# Altium footprint library Connector_SMD.PcbLib: 116 footprints (part 2 of 8)
Each footprint in its own frame and in the unit in brackets; x right, y up, seen from the top. Pads: shape width x height; smd on the part's side, far side on the other; paste and mask are expansions set on the pad; w line width, h text height; cw(c..) or ccw(c..) is an arc to the next point about the centre after c.
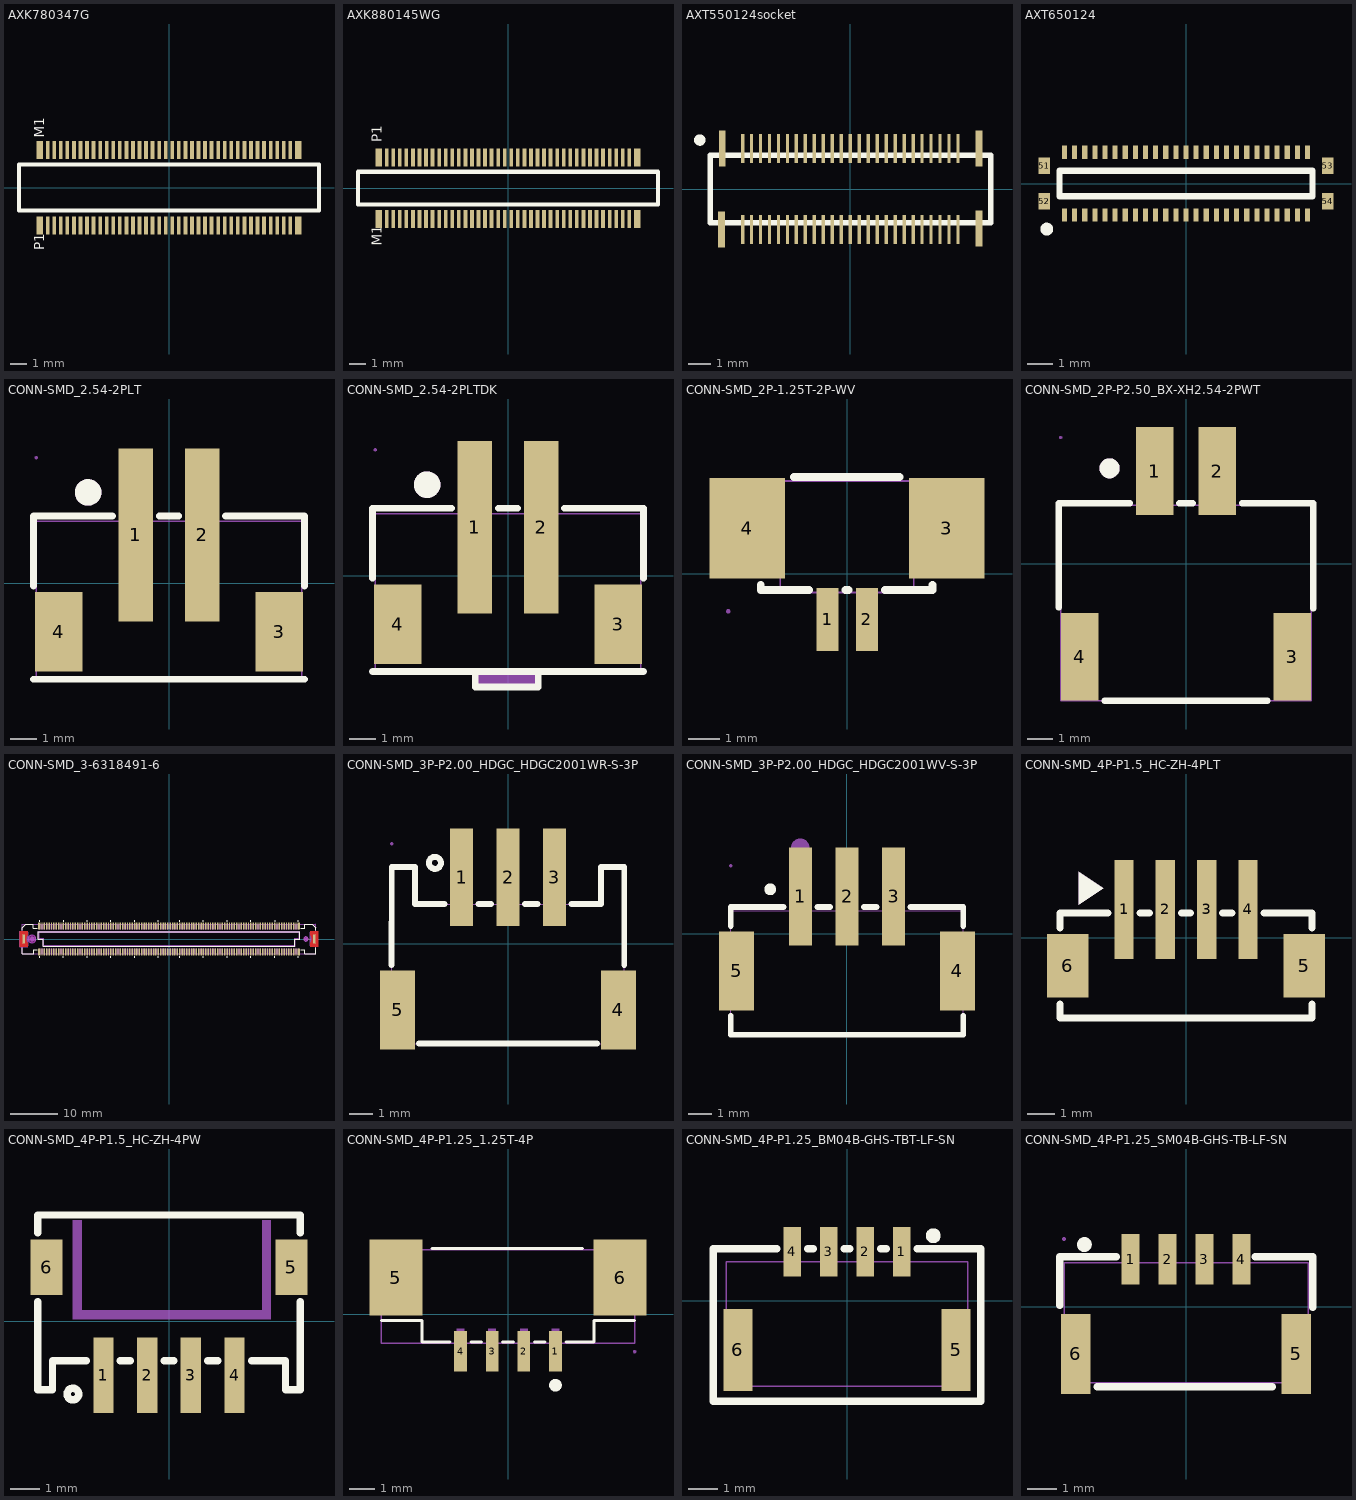
[diagram p1: the footprints below, top view; thin cyan lines are the x and y axes]

## AXK780347G [mm]
height 2
pads (80):
  rect 0.4x1.1 smd: M1(-7.885,2.3) M40(7.885,2.3) P1(-7.885,-2.3) P40(7.885,-2.3)
  rect 0.23x1.1 smd: M2(-7.4,2.3) M3(-7,2.3) M4(-6.6,2.3) M5(-6.2,2.3) M6(-5.8,2.3) M7(-5.4,2.3) M8(-5,2.3) M9(-4.6,2.3) M10(-4.2,2.3) M11(-3.8,2.3) M12(-3.4,2.3) M13(-3,2.3) M14(-2.6,2.3) M15(-2.2,2.3) M16(-1.8,2.3) M17(-1.4,2.3) M18(-1,2.3) M19(-0.6,2.3) M20(-0.2,2.3) M21(0.2,2.3) M22(0.6,2.3) M23(1,2.3) M24(1.4,2.3) M25(1.8,2.3) M26(2.2,2.3) M27(2.6,2.3) M28(3,2.3) M29(3.4,2.3) M30(3.8,2.3) M31(4.2,2.3) M32(4.6,2.3) M33(5,2.3) M34(5.4,2.3) M35(5.8,2.3) M36(6.2,2.3) M37(6.6,2.3) M38(7,2.3) M39(7.4,2.3) P2(-7.4,-2.3) P3(-7,-2.3) P4(-6.6,-2.3) P5(-6.2,-2.3) P6(-5.8,-2.3) P7(-5.4,-2.3) P8(-5,-2.3) P9(-4.6,-2.3) P10(-4.2,-2.3) P11(-3.8,-2.3) P12(-3.4,-2.3) P13(-3,-2.3) P14(-2.6,-2.3) P15(-2.2,-2.3) P16(-1.8,-2.3) P17(-1.4,-2.3) P18(-1,-2.3) P19(-0.6,-2.3) P20(-0.2,-2.3) P21(0.2,-2.3) P22(0.6,-2.3) P23(1,-2.3) P24(1.4,-2.3) P25(1.8,-2.3) P26(2.2,-2.3) P27(2.6,-2.3) P28(3,-2.3) P29(3.4,-2.3) P30(3.8,-2.3) P31(4.2,-2.3) P32(4.6,-2.3) P33(5,-2.3) P34(5.4,-2.3) P35(5.8,-2.3) P36(6.2,-2.3) P37(6.6,-2.3) P38(7,-2.3) P39(7.4,-2.3)
Top Overlay:
  lines w0.254: -9.15,-1.4 -9.15,1.4 9.15,1.4 9.15,-1.4 -9.15,-1.4
  text "P1" at -7.6,-3.825 h0.6
  text "M1" at -7.6,3.05 h0.6

## AXK880145WG [mm]
pads (80):
  rect 0.4x1.1 smd: M1(-7.885,-1.88) M40(7.885,-1.88) P1(-7.885,1.88) P40(7.885,1.88)
  rect 0.23x1.1 smd: M2(-7.4,-1.88) M3(-7,-1.88) M4(-6.6,-1.88) M5(-6.2,-1.88) M6(-5.8,-1.88) M7(-5.4,-1.88) M8(-5,-1.88) M9(-4.6,-1.88) M10(-4.2,-1.88) M11(-3.8,-1.88) M12(-3.4,-1.88) M13(-3,-1.88) M14(-2.6,-1.88) M15(-2.2,-1.88) M16(-1.8,-1.88) M17(-1.4,-1.88) M18(-1,-1.88) M19(-0.6,-1.88) M20(-0.2,-1.88) M21(0.2,-1.88) M22(0.6,-1.88) M23(1,-1.88) M24(1.4,-1.88) M25(1.8,-1.88) M26(2.2,-1.88) M27(2.6,-1.88) M28(3,-1.88) M29(3.4,-1.88) M30(3.8,-1.88) M31(4.2,-1.88) M32(4.6,-1.88) M33(5,-1.88) M34(5.4,-1.88) M35(5.8,-1.88) M36(6.2,-1.88) M37(6.6,-1.88) M38(7,-1.88) M39(7.4,-1.88) P2(-7.4,1.88) P3(-7,1.88) P4(-6.6,1.88) P5(-6.2,1.88) P6(-5.8,1.88) P7(-5.4,1.88) P8(-5,1.88) P9(-4.6,1.88) P10(-4.2,1.88) P11(-3.8,1.88) P12(-3.4,1.88) P13(-3,1.88) P14(-2.6,1.88) P15(-2.2,1.88) P16(-1.8,1.88) P17(-1.4,1.88) P18(-1,1.88) P19(-0.6,1.88) P20(-0.2,1.88) P21(0.2,1.88) P22(0.6,1.88) P23(1,1.88) P24(1.4,1.88) P25(1.8,1.88) P26(2.2,1.88) P27(2.6,1.88) P28(3,1.88) P29(3.4,1.88) P30(3.8,1.88) P31(4.2,1.88) P32(4.6,1.88) P33(5,1.88) P34(5.4,1.88) P35(5.8,1.88) P36(6.2,1.88) P37(6.6,1.88) P38(7,1.88) P39(7.4,1.88)
Top Overlay:
  lines w0.254: -9.15,-1 -9.15,1 9.15,1 9.15,-1 -9.15,-1
  text "P1" at -7.7,2.8 h0.6
  text "M1" at -7.7,-3.5 h0.6

## AXT550124socket [mm]
pads (54):
  rect 0.15x1.3 smd mask+0.102: 1(-4.802,1.8) 2(-4.802,-1.8) 3(-4.402,1.8) 4(-4.402,-1.8) 5(-4.002,1.8) 6(-4.002,-1.8) 7(-3.602,1.8) 8(-3.602,-1.8) 9(-3.202,1.8) 10(-3.202,-1.8) 11(-2.802,1.8) 12(-2.802,-1.8) 13(-2.402,1.8) 14(-2.402,-1.8) 15(-2.002,1.8) 16(-2.002,-1.8) 17(-1.602,1.8) 18(-1.602,-1.8) 19(-1.202,1.8) 20(-1.202,-1.8) 21(-0.802,1.8) 22(-0.802,-1.8) 23(-0.402,1.8) 24(-0.402,-1.8) 25(-0.002,1.8) 26(-0.002,-1.8) 27(0.398,1.8) 28(0.398,-1.8) 29(0.798,1.8) 30(0.798,-1.8) 31(1.198,1.8) 32(1.198,-1.8) 33(1.598,1.8) 34(1.598,-1.8) 35(1.998,1.8) 36(1.998,-1.8) 37(2.398,1.8) 38(2.398,-1.8) 39(2.798,1.8) 40(2.798,-1.8) 41(3.198,1.8) 42(3.198,-1.8) 43(3.598,1.8) 44(3.598,-1.8) 45(3.998,1.8) 46(3.998,-1.8) 47(4.398,1.8) 48(4.398,-1.8) 49(4.798,1.8) 50(4.798,-1.8)
  rect 0.3x1.6 smd mask+0.102: 51(-5.709,1.8) 52(-5.739,-1.8) 53(5.739,1.8) 54(5.739,-1.756)
Top Overlay:
  circle w0.254: c-6.707,2.181 r0.127
  lines w0.254: -6.242,-1.502 6.258,-1.502 6.258,1.498 -6.242,1.498 -6.242,-1.502
3D body "axt550124.stp": height 0.97, standoff 0, extent -6.25,-1.8 6.25,1.8

## AXT650124 [mm]
pads (54):
  rect 0.2x0.52 smd mask+0.102: 1(-4.8,-1.24) 2(-4.8,1.24) 3(-4.4,-1.24) 4(-4.4,1.24) 5(-4,-1.24) 6(-4,1.24) 7(-3.6,-1.24) 8(-3.6,1.24) 9(-3.2,-1.24) 10(-3.2,1.24) 11(-2.8,-1.24) 12(-2.8,1.24) 13(-2.4,-1.24) 14(-2.4,1.24) 15(-2,-1.24) 16(-2,1.24) 17(-1.6,-1.24) 18(-1.6,1.24) 19(-1.2,-1.24) 20(-1.2,1.24) 21(-0.8,-1.24) 22(-0.8,1.24) 23(-0.4,-1.24) 24(-0.4,1.24) 25(0,-1.24) 26(0,1.24) 27(0.4,-1.24) 28(0.4,1.24) 29(0.8,-1.24) 30(0.8,1.24) 31(1.2,-1.24) 32(1.2,1.24) 33(1.6,-1.24) 34(1.6,1.24) 35(2,-1.24) 36(2,1.24) 37(2.4,-1.24) 38(2.4,1.24) 39(2.8,-1.24) 40(2.8,1.24) 41(3.2,-1.24) 42(3.2,1.24) 43(3.6,-1.24) 44(3.6,1.24) 45(4,-1.24) 46(4,1.24) 47(4.4,-1.24) 48(4.4,1.24) 49(4.8,-1.24) 50(4.8,1.24)
  rect 0.45x0.655 smd mask+0.102: 51(-5.6,0.703) 52(-5.6,-0.703) 53(5.6,0.703) 54(5.6,-0.703)
Top Overlay:
  circle w0.254: c-5.5,-1.8 r0.127
  lines w0.254: -5,-0.5 5,-0.5 5,0.5 -5,0.5 -5,-0.5
3D body "axt650124.stp": height 0.83, standoff 0, extent -5.898,-1.3 5.902,1.3

## CONN-SMD_2.54-2PLT [mm]
pads (4):
  rect 1.3x6.5 smd paste+0 mask+0.05: 1(-1.25,1.825) 2(1.25,1.825)
  rect 1.8x3 smd paste+0 mask+0.05: 3(4.15,-1.825) 4(-4.15,-1.825)
Top Overlay:
  circle w0.5: c-3.048,3.429 r0.25
  lines w0.254: -5.1,-3.61 5.1,-3.61 ; -5.1,-0.099 -5.1,2.54 -3.83,2.54 -2.131,2.54 ; -0.369,2.54 0.369,2.54 ; 2.131,2.54 3.83,2.54 5.1,2.54 5.1,-0.099
Mechanical 6:
  circle w0.5: c-3.048,3.429 r0.25
Mechanical 15:
  region: -4.94,4.74 -4.94,4.765 -4.975,4.8 -5.025,4.8 -5.06,4.765 -5.06,4.74 -5.06,4.715 -5.025,4.68 -4.975,4.68 -4.94,4.715 -4.94,4.74
  region: -1.565,4.74 -0.935,4.74 -0.935,-0.26 -1.565,-0.26
  region: 0.935,4.74 1.565,4.74 1.565,-0.26 0.935,-0.26
  region: 3.75,-0.825 4.55,-0.825 4.55,-2.825 3.75,-2.825
  region: -4.55,-0.825 -3.75,-0.825 -3.75,-2.825 -4.55,-2.825
  lines w0.051: -5,-3.61 -5,2.34 5,2.34 5,-3.61 -5,-3.61
3D body "CN1.stp": height 8, standoff 0, extent -5.001,-3.774 5,5.226

## CONN-SMD_2.54-2PLTDK [mm]
pads (4):
  rect 1.3x6.5 smd paste+0 mask+0.05: 1(-1.25,1.825) 2(1.25,1.825)
  rect 1.8x3 smd paste+0 mask+0.05: 3(4.15,-1.825) 4(-4.15,-1.825)
Top Overlay:
  circle w0.5: c-3.048,3.429 r0.25
  lines w0.254: -5.1,-3.61 5.1,-3.61 ; -5.1,-0.099 -5.1,2.54 -3.83,2.54 -2.131,2.54 ; -1.236,-3.61 -1.236,-4.191 1.143,-4.191 1.143,-3.61 ; -0.369,2.54 0.369,2.54 ; 2.131,2.54 3.83,2.54 5.1,2.54 5.1,-0.099
Mechanical 6:
  circle w0.5: c-3.048,3.429 r0.25
  region: -1.27,-3.556 -1.27,-4.191 1.143,-4.191 1.143,-3.556
Mechanical 15:
  region: -4.94,4.74 -4.94,4.765 -4.975,4.8 -5.025,4.8 -5.06,4.765 -5.06,4.74 -5.06,4.715 -5.025,4.68 -4.975,4.68 -4.94,4.715 -4.94,4.74
  region: -1.565,4.74 -0.935,4.74 -0.935,-0.26 -1.565,-0.26
  region: 0.935,4.74 1.565,4.74 1.565,-0.26 0.935,-0.26
  region: 3.75,-0.825 4.55,-0.825 4.55,-2.825 3.75,-2.825
  region: -4.55,-0.825 -3.75,-0.825 -3.75,-2.825 -4.55,-2.825
  lines w0.051: -5,-3.61 -5,2.34 5,2.34 5,-3.61 -5,-3.61
3D body "U1.stp": height 7.92, standoff 0, extent -5,-4.593 5,4.307

## CONN-SMD_2P-1.25T-2P-WV [mil]
pads (4):
  rect 27.6x78.7 smd mask+2: 1(-24.4,-57.1) 2(24.8,-57.1)
  rect 94.5x126 smd mask+2: 3(125,57.1) 4(-125,57.1)
Top Overlay:
  lines w10: -108.1,-14.2 -108.1,-20.5 -83.5,-20.5 -47.5,-20.5 ; -66.3,121.2 65.9,121.2 ; -1.8,-20.5 1.7,-20.5 ; 47.5,-20.5 82.3,-20.5 107.3,-20.5 107.3,-14.2
Mechanical 15:
  region: -146.4,-47 -146.4,-46.01 -147.81,-44.6 -149.79,-44.6 -151.2,-46.01 -151.2,-47 -151.2,-47.99 -149.79,-49.4 -147.81,-49.4 -146.4,-47.99 -146.4,-47
  region: -30.3,-21.4 -18.5,-21.4 -18.5,-47 -30.3,-47
  region: 18.9,-21.4 30.7,-21.4 30.7,-47 18.9,-47
  region: 81.5,111.1 148.4,111.1 148.4,8.7 81.5,8.7
  region: -148.8,111 -81.9,111 -81.9,8.7 -148.8,8.7
  lines w2: -148.6,0 -83.7,0 -83.7,-23.4 83.7,-23.4 83.7,0 148.6,0 148.6,116.4 -148.6,116.4 -148.6,0
3D body "CN1.stp": height 185.02, standoff 0, extent -150.37,-42.5 150.77,118.94

## CONN-SMD_2P-P2.50_BX-XH2.54-2PWT [mm]
pads (4):
  rect 1.5x3.5 smd: 1(-1.25,3.7) 2(1.25,3.7) 3(4.23,-3.7) 4(-4.23,-3.7)
Top Overlay:
  circle w0.4: c-3.048,3.81 r0.2
  lines w0.254: -5.08,-1.742 -5.08,2.413 -2.231,2.413 ; -3.249,-5.461 3.249,-5.461 ; -0.269,2.413 0.269,2.413 ; 2.231,2.413 5.08,2.413 5.08,-1.778
Mechanical 6:
  circle w0.4: c-3.048,3.81 r0.2
Mechanical 15:
  region: -4.48,-2.2 -3.98,-2.2 -3.98,-5.2 -4.48,-5.2
  region: 3.98,-2.2 4.48,-2.2 4.48,-5.2 3.98,-5.2
  region: -1.57,5.039 -0.93,5.039 -0.93,2.039 -1.57,2.039
  region: 0.93,5.039 1.57,5.039 1.57,2.039 0.93,2.039
  region: -4.94,5.039 -4.941,5.063 -4.976,5.097 -5.024,5.097 -5.059,5.063 -5.06,5.039 -5.059,5.015 -5.024,4.981 -4.976,4.981 -4.941,5.015 -4.94,5.039
  lines w0.051: -5,-5.461 5,-5.461 5,2.339 -5,2.339 -5,-5.461
3D body "Gnj5-U1.stp": height 6.2, standoff 0, extent -5,-5.255 5,5.245

## CONN-SMD_3-6318491-6 [mm]
pads (222):
  rect 0.45x1.5 smd mask+0.051: 1(27.325,2.7) 2(27.325,-2.7) 219(-27.325,2.7) 220(-27.325,-2.7)
  rect 0.3x1.5 smd mask+0.051: 3(26.75,2.7) 4(26.75,-2.7) 5(26.25,2.7) 6(26.25,-2.7) 7(25.75,2.7) 8(25.75,-2.7) 9(25.25,2.7) 10(25.25,-2.7) 11(24.75,2.7) 12(24.75,-2.7) 13(24.25,2.7) 14(24.25,-2.7) 15(23.75,2.7) 16(23.75,-2.7) 17(23.25,2.7) 18(23.25,-2.7) 19(22.75,2.7) 20(22.75,-2.7) 21(22.25,2.7) 22(22.25,-2.7) 23(21.75,2.7) 24(21.75,-2.7) 25(21.25,2.7) 26(21.25,-2.7) 27(20.75,2.7) 28(20.75,-2.7) 29(20.25,2.7) 30(20.25,-2.7) 31(19.75,2.7) 32(19.75,-2.7) 33(19.25,2.7) 34(19.25,-2.7) 35(18.75,2.7) 36(18.75,-2.7) 37(18.25,2.7) 38(18.25,-2.7) 39(17.75,2.7) 40(17.75,-2.7) 41(17.25,2.7) 42(17.25,-2.7) 43(16.75,2.7) 44(16.75,-2.7) 45(16.25,2.7) 46(16.25,-2.7) 47(15.75,2.7) 48(15.75,-2.7) 49(15.25,2.7) 50(15.25,-2.7) 51(14.75,2.7) 52(14.75,-2.7) 53(14.25,2.7) 54(14.25,-2.7) 55(13.75,2.7) 56(13.75,-2.7) 57(13.25,2.7) 58(13.25,-2.7) 59(12.75,2.7) 60(12.75,-2.7) 61(12.25,2.7) 62(12.25,-2.7) 63(11.75,2.7) 64(11.75,-2.7) 65(11.25,2.7) 66(11.25,-2.7) 67(10.75,2.7) 68(10.75,-2.7) 69(10.25,2.7) 70(10.25,-2.7) 71(9.75,2.7) 72(9.75,-2.7) 73(9.25,2.7) 74(9.25,-2.7) 75(8.75,2.7) 76(8.75,-2.7) 77(8.25,2.7) 78(8.25,-2.7) 79(7.75,2.7) 80(7.75,-2.7) 81(7.25,2.7) 82(7.25,-2.7) 83(6.75,2.7) 84(6.75,-2.7) 85(6.25,2.7) 86(6.25,-2.7) 87(5.75,2.7) 88(5.75,-2.7) 89(5.25,2.7) 90(5.25,-2.7) 91(4.75,2.7) 92(4.75,-2.7) 93(4.25,2.7) 94(4.25,-2.7) 95(3.75,2.7) 96(3.75,-2.7) 97(3.25,2.7) 98(3.25,-2.7) 99(2.75,2.7) 100(2.75,-2.7) 101(2.25,2.7) 102(2.25,-2.7) 103(1.75,2.7) 104(1.75,-2.7) 105(1.25,2.7) 106(1.25,-2.7) 107(0.75,2.7) 108(0.75,-2.7) 109(0.25,2.7) 110(0.25,-2.7) 111(-0.25,2.7) 112(-0.25,-2.7) 113(-0.75,2.7) 114(-0.75,-2.7) 115(-1.25,2.7) 116(-1.25,-2.7) 117(-1.75,2.7) 118(-1.75,-2.7) 119(-2.25,2.7) 120(-2.25,-2.7) 121(-2.75,2.7) 122(-2.75,-2.7) 123(-3.25,2.7) 124(-3.25,-2.7) 125(-3.75,2.7) 126(-3.75,-2.7) 127(-4.25,2.7) 128(-4.25,-2.7) 129(-4.75,2.7) 130(-4.75,-2.7) 131(-5.25,2.7) 132(-5.25,-2.7) 133(-5.75,2.7) 134(-5.75,-2.7) 135(-6.25,2.7) 136(-6.25,-2.7) 137(-6.75,2.7) 138(-6.75,-2.7) 139(-7.25,2.7) 140(-7.25,-2.7) 141(-7.75,2.7) 142(-7.75,-2.7) 143(-8.25,2.7) 144(-8.25,-2.7) 145(-8.75,2.7) 146(-8.75,-2.7) 147(-9.25,2.7) 148(-9.25,-2.7) 149(-9.75,2.7) 150(-9.75,-2.7) 151(-10.25,2.7) 152(-10.25,-2.7) 153(-10.75,2.7) 154(-10.75,-2.7) 155(-11.25,2.7) 156(-11.25,-2.7) 157(-11.75,2.7) 158(-11.75,-2.7) 159(-12.25,2.7) 160(-12.25,-2.7) 161(-12.75,2.7) 162(-12.75,-2.7) 163(-13.25,2.7) 164(-13.25,-2.7) 165(-13.75,2.7) 166(-13.75,-2.7) 167(-14.25,2.7) 168(-14.25,-2.7) 169(-14.75,2.7) 170(-14.75,-2.7) 171(-15.25,2.7) 172(-15.25,-2.7) 173(-15.75,2.7) 174(-15.75,-2.7) 175(-16.25,2.7) 176(-16.25,-2.7) 177(-16.75,2.7) 178(-16.75,-2.7) 179(-17.25,2.7) 180(-17.25,-2.7) 181(-17.75,2.7) 182(-17.75,-2.7) 183(-18.25,2.7) 184(-18.25,-2.7) 185(-18.75,2.7) 186(-18.75,-2.7) 187(-19.25,2.7) 188(-19.25,-2.7) 189(-19.75,2.7) 190(-19.75,-2.7) 191(-20.25,2.7) 192(-20.25,-2.7) 193(-20.75,2.7) 194(-20.75,-2.7) 195(-21.25,2.7) 196(-21.25,-2.7) 197(-21.75,2.7) 198(-21.75,-2.7) 199(-22.25,2.7) 200(-22.25,-2.7) 201(-22.75,2.7) 202(-22.75,-2.7) 203(-23.25,2.7) 204(-23.25,-2.7) 205(-23.75,2.7) 206(-23.75,-2.7) 207(-24.25,2.7) 208(-24.25,-2.7) 209(-24.75,2.7) 210(-24.75,-2.7) 211(-25.25,2.7) 212(-25.25,-2.7) 213(-25.75,2.7) 214(-25.75,-2.7) 215(-26.25,2.7) 216(-26.25,-2.7) 217(-26.75,2.7) 218(-26.75,-2.7)
  rect 0.5x2 smd mask+0.051: 221(-30.6,0) 222(30.6,0)
Top Layer:
  region: -31.4,-1.65 -31.4,1.65 -29.75,1.65 -29.75,0.794 -29.818,0.709 -29.93,0.524 -30.006,0.321 -30.045,0.108 -30.045,-0.108 -30.006,-0.321 -29.93,-0.524 -29.818,-0.709 -29.75,-0.794 -29.75,-0.795 -29.75,-1.65
  region: 31.4,-1.65 31.4,1.65 29.75,1.65 29.75,0.794 29.818,0.709 29.93,0.524 30.006,0.321 30.045,0.108 30.045,-0.108 30.006,-0.321 29.93,-0.524 29.818,-0.709 29.75,-0.794 29.75,-0.795 29.75,-1.65
Top Overlay:
  lines w0.254: -30.9,-1.881 -30.9,-3.1 -28.5,-3.1 -28.5,-2.25 -27.781,-2.25 ; -30.899,1.88 -30.899,2.421 -30.221,3.099 -28.549,3.099 -28.549,2.251 -27.78,2.251 ; -27.5,1.5 -27.5,-0.01 -26.5,-0.01 -26.5,-1.5 26.5,-1.5 26.5,-0.01 27.5,-0.01 27.5,1.5 -27.49,1.5 ; -27.25,-4 -27.25,-3.625 ; -27.25,3.625 -27.25,4 ; -22.25,-4 -22.25,-3.625 ; -22.25,3.625 -22.25,4 ; -17.25,-4 -17.25,-3.625 ; -17.25,3.625 -17.25,4 ; -12.25,-4 -12.25,-3.625 ; -12.25,3.625 -12.25,4 ; -7.25,-4 -7.25,-3.625 ; -7.25,3.625 -7.25,4 ; -2.25,-4 -2.25,-3.625 ; -2.25,3.625 -2.25,4 ; 2.25,-4 2.25,-3.625 ; 2.25,3.625 2.25,4 ; 7.25,-4 7.25,-3.625 ; 7.25,3.625 7.25,4 ; 12.25,-4 12.25,-3.625 ; 12.25,3.625 12.25,4 ; 17.25,-4 17.25,-3.625 ; 17.25,3.625 17.25,4 ; 22.25,-4 22.25,-3.625 ; 22.25,3.625 22.25,4 ; 27.25,-4 27.25,-3.625 ; 27.25,3.625 27.25,4 ; 27.781,-2.25 28.55,-2.25 28.55,-3.1 28.762,-3.1 30.9,-3.1 30.9,-1.881 ; 27.781,2.25 28.55,2.25 28.55,3.1 30.22,3.1 30.9,2.42 30.9,1.881
Keep-Out Layer:
  board cut-out: 29.3,0 29.3,0.09 29.231,0.255 29.105,0.382 28.939,0.45 28.76,0.45 28.595,0.382 28.468,0.255 28.4,0.09 28.4,0 28.4,-0.09 28.468,-0.255 28.595,-0.382 28.76,-0.45 28.939,-0.45 29.105,-0.382 29.231,-0.255 29.3,-0.09 29.3,0
  board cut-out: -28.05,0 -28.05,0.105 -28.104,0.309 -28.21,0.491 -28.359,0.64 -28.541,0.745 -28.745,0.8 -28.955,0.8 -29.159,0.745 -29.341,0.64 -29.49,0.491 -29.595,0.309 -29.65,0.105 -29.65,0 -29.65,-0.105 -29.595,-0.309 -29.49,-0.491 -29.341,-0.64 -29.159,-0.745 -28.955,-0.8 -28.745,-0.8 -28.541,-0.745 -28.359,-0.64 -28.21,-0.491 -28.104,-0.309 -28.05,-0.105 -28.05,0
Mechanical 1:
  circle w0.005: c28.85,0 r0.45
  circle w0.005: c-28.85,0 r0.8
Mechanical 3:
  lines w0.025: -29.75,-0.794 cw(c-28.85,0) -29.75,0.794 -29.75,1.65 -31.4,1.65 -31.4,-1.65 -29.75,-1.65 ; -29.75,-1.65 -29.75,-0.795 ; -29.75,-1.65 -29.75,-1.65 ; -29.75,-0.795 -29.75,-0.795
Mechanical 6:
  circle w0.35: c28.85,0 r0.175
  circle w0.5: c-28.85,0 r0.25
  region: -27.35,1.35 27.3,1.35 27.3,0.15 26.35,0.15 26.35,-1.35 -26.35,-1.35 -26.35,-1.6 26.6,-1.6 26.6,-0.1 27.55,-0.1 27.55,1.6 -27.4,1.6 -27.4,1.35
  region: -26.35,-1.6 -26.6,-1.6 -26.6,-0.1 -27.65,-0.1 -27.65,1.6 -27.35,1.6 -27.35,0.2 -26.35,0.2
Mechanical 15:
  drawing of 227 lines, arcs and shapes, not listed
3D body "CN1.stp": height 7.45, standoff -0.6, extent -30.9,-3.1 30.9,3.1

## CONN-SMD_3P-P2.00_HDGC_HDGC2001WR-S-3P [mil]
pads (5):
  rect 39.4x165.4 smd mask+1.97: 1(-78.7,112.2) 2(0,112.2) 3(78.7,112.2)
  rect 59.1x133.9 smd mask+1.97: 4(187,-112.2) 5(-187,-112.2)
Top Overlay:
  circle w10: c-123.6,136.8 r10.2
  lines w10: -196.9,-36.2 -196.8,114.2 -196.8,129.9 -157.5,129.9 -157.5,66.9 -107.5,66.9 ; -150.6,-169.3 150.6,-169.3 ; -50,66.9 -28.8,66.9 ; 28.8,66.9 50,66.9 ; 107.5,66.9 157.5,66.9 157.5,129.9 196.8,129.9 196.8,114.2 196.8,-36.2
Mechanical 6:
  circle w15.7: c-80.7,177.2 r7.9
Mechanical 15:
  region: -194.5,169.3 -194.5,170.29 -195.91,171.7 -197.89,171.7 -199.3,170.29 -199.3,169.3 -199.3,168.31 -197.89,166.9 -195.91,166.9 -194.5,168.31 -194.5,169.3
  region: -88.6,169.3 -68.9,169.3 -68.9,51.2 -88.6,51.2
  region: -9.8,169.3 9.8,169.3 9.8,51.2 -9.8,51.2
  region: 68.9,169.3 88.6,169.3 88.6,51.2 68.9,51.2
  region: 163.4,-59.1 179.2,-59.1 179.2,-169.3 163.4,-169.3
  region: -179.2,-59.1 -163.4,-59.1 -163.4,-169.3 -179.2,-169.3
  lines w2: -196.9,129.9 -196.8,66.9 -196.8,-169.3 196.9,-169.3 196.9,66.9 196.8,129.9 157.5,129.9 157.5,66.9 -157.5,66.9 -157.5,129.9 -196.9,129.9
3D body "CN1.stp": height 221.26, standoff 0, extent -196.85,-169.29 196.89,169.29

## CONN-SMD_3P-P2.00_HDGC_HDGC2001WV-S-3P [mm]
pads (5):
  rect 1x4.2 smd mask+0.05: 1(-2,1.6) 2(0,1.6) 3(2,1.6)
  rect 1.5x3.4 smd mask+0.05: 4(4.75,-1.6) 5(-4.75,-1.6)
Top Overlay:
  circle w0.254: c-3.302,1.905 r0.127
  lines w0.254: -5,-3.531 -5,-4.35 5,-4.35 5,-3.531 ; -5,0.331 -5,1.15 -2.731,1.15 ; -1.269,1.15 -0.731,1.15 ; 0.731,1.15 1.269,1.15 ; 2.731,1.15 5,1.15 5,0.331
Mechanical 6:
  circle w0.4: c-2.013,3.688 r0.2
Mechanical 15:
  region: -4.94,2.924 -4.94,2.948 -4.975,2.984 -5.025,2.984 -5.06,2.948 -5.06,2.924 -5.06,2.899 -5.025,2.864 -4.975,2.864 -4.94,2.899 -4.94,2.924
  region: 1.75,2.924 2.25,2.924 2.25,-0.276 1.75,-0.276
  region: -0.25,2.924 0.25,2.924 0.25,-0.276 -0.25,-0.276
  region: -2.25,2.924 -1.75,2.924 -1.75,-0.276 -2.25,-0.276
  region: -5,-0.4 -4,-0.4 -4,-2.8 -5,-2.8
  region: 4,-0.4 5,-0.4 5,-2.8 4,-2.8
  lines w0.051: -5,-4.326 -5,0.974 5,0.974 5,-4.326 -5,-4.326
3D body "CN1.stp": height 6.67, standoff 0, extent -5,-4.3 5,3.151

## CONN-SMD_4P-P1.5_HC-ZH-4PLT [mm]
pads (6):
  rect 0.7x3.6 smd: 1(-2.25,1.025) 2(-0.75,1.025) 3(0.75,1.025) 4(2.25,1.025)
  rect 1.5x2.3 smd: 5(4.3,-1.025) 6(-4.3,-1.025)
Top Overlay:
  region: -3.9,2.4 -3.9,1.2 -3,1.8
  lines w0.254: -4.572,-2.406 -4.572,-2.921 4.572,-2.921 4.572,-2.406 ; -4.572,0.356 -4.572,0.889 -2.831,0.889 ; -1.669,0.889 -1.331,0.889 ; -0.169,0.889 0.169,0.889 ; 1.331,0.889 1.669,0.889 ; 2.831,0.889 4.572,0.889 4.572,0.356
Mechanical 15:
  region: -3.9,2.4 -3.9,1.2 -3,1.8
3D body "CN3.stp": height 5.1, standoff 0, extent -4.5,-2.881 4.5,2.319
3D body "CN3.stp": height 5.1, standoff 0, extent -4.5,-2.881 4.5,2.319

## CONN-SMD_4P-P1.5_HC-ZH-4PW [mm]
pads (6):
  rect 0.7x2.6 smd: 1(-2.25,-1.85) 2(-0.75,-1.85) 3(0.75,-1.85) 4(2.25,-1.85)
  rect 1.1x1.9 smd: 5(4.2,1.85) 6(-4.2,1.85)
Top Overlay:
  circle w0.254: c-3.3,-2.5 r0.2
  lines w0.254: -4.5,0.669 -4.5,-2.35 -4,-2.35 -4,-1.35 -2.831,-1.35 ; -4.5,3.031 -4.5,3.65 4.5,3.65 4.5,3.031 ; -1.669,-1.35 -1.331,-1.35 ; -0.169,-1.35 0.169,-1.35 ; 1.331,-1.35 1.669,-1.35 ; 2.831,-1.35 4,-1.35 4,-2.35 4.5,-2.35 4.5,0.669
Mechanical 15:
  region: -3.3,3.475 -3.3,0.075 3.5,0.075 3.5,3.475 3.2,3.475 3.2,3.375 3.2,0.375 -3,0.375 -3,3.475
3D body "CN1.stp": height 3.8, standoff 0, extent -4.5,-2.8 4.5,3.699

## CONN-SMD_4P-P1.25_1.25T-4P [mm]
pads (6):
  rect 0.5x1.6 smd mask+0.051: 1(1.875,-1.45) 2(0.625,-1.45) 3(-0.625,-1.45) 4(-1.875,-1.45)
  rect 2.1x3 smd mask+0.051: 5(-4.425,1.45) 6(4.425,1.45)
Top Overlay:
  lines w0.12: -5,-0.25 -3.4,-0.25 -3.4,-1.1 -2.289,-1.1 ; -3,2.6 2.95,2.6 ; -1.461,-1.1 -1.039,-1.1 ; -0.211,-1.1 0.211,-1.1 ; 1.039,-1.1 1.461,-1.1 ; 2.289,-1.1 3.4,-1.1 3.4,-0.25 5,-0.25
  lines w0.249: 2,-2.803 cw(c1.875,-2.801) 2,-2.8
Mechanical 6:
  circle w0.24: c1.9,-1.95 r0.12
Mechanical 15:
  region: 5.06,-1.47 5.06,-1.445 5.025,-1.41 4.975,-1.41 4.94,-1.445 4.94,-1.47 4.94,-1.495 4.975,-1.53 5.025,-1.53 5.06,-1.495 5.06,-1.47
  region: 2.025,-1.47 1.725,-1.47 1.725,-0.57 2.025,-0.57
  region: 0.775,-1.47 0.475,-1.47 0.475,-0.57 0.775,-0.57
  region: -0.475,-1.47 -0.775,-1.47 -0.775,-0.57 -0.475,-0.57
  region: -1.725,-1.47 -2.025,-1.47 -2.025,-0.57 -1.725,-0.57
  region: 5,0.55 3.5,0.55 3.5,2.55 5,2.55
  region: -3.5,0.55 -5,0.55 -5,2.55 -3.5,2.55
  lines w0.051: -5,-1.15 -5,2.55 5,2.55 5,-1.15 -5,-1.15
3D body "3D_PCB1_2022-04-16.stp": height 4.7, standoff 0, extent -5.075,-1.55 5.075,2.55

## CONN-SMD_4P-P1.25_BM04B-GHS-TBT-LF-SN [mm]
pads (6):
  rect 0.6x1.7 smd: 1(1.875,1.675) 2(0.625,1.675) 3(-0.625,1.675) 4(-1.875,1.675)
  rect 1x2.8 smd: 5(3.725,-1.675) 6(-3.725,-1.675)
Top Overlay:
  circle w0.254: c2.946,2.222 r0.127
  lines w0.254: -2.405,1.778 -4.572,1.778 -4.572,-3.429 4.572,-3.429 4.572,1.778 2.405,1.778 ; -1.344,1.778 -1.156,1.778 ; -0.094,1.778 0.094,1.778 ; 1.156,1.778 1.344,1.778
Mechanical 15:
  region: -4.004,-2.921 -4.005,-2.897 -4.04,-2.862 -4.088,-2.862 -4.123,-2.897 -4.124,-2.921 -4.123,-2.946 -4.088,-2.98 -4.04,-2.98 -4.005,-2.946 -4.004,-2.921
  region: -1.975,1.975 -1.775,1.975 -1.775,1.175 -1.975,1.175
  region: -0.725,1.975 -0.525,1.975 -0.525,1.175 -0.725,1.175
  region: 0.525,1.975 0.725,1.975 0.725,1.175 0.525,1.175
  region: 1.775,1.975 1.975,1.975 1.975,1.175 1.775,1.175
  region: 3.325,-0.575 4.125,-0.575 4.125,-2.775 3.325,-2.775
  region: -4.125,-0.575 -3.325,-0.575 -3.325,-2.775 -4.125,-2.775
  lines w0.051: -4.125,-2.921 4.125,-2.921 4.125,1.329 -4.125,1.329 -4.125,-2.921
3D body "立贴.step": height 4.06, standoff 0, extent -4.125,-2.934 4.125,2.026

## CONN-SMD_4P-P1.25_SM04B-GHS-TB-LF-SN [mm]
pads (6):
  rect 0.6x1.7 smd: 1(-1.876,1.6) 2(-0.626,1.6) 3(0.625,1.6) 4(1.875,1.6)
  rect 1x2.7 smd: 5(3.725,-1.6) 6(-3.725,-1.6)
Top Overlay:
  circle w0.25: c-3.438,2.099 r0.125
  lines w0.254: -4.27,0.04 -4.27,1.69 -2.36,1.69 ; -3,-2.71 2.92,-2.71 ; 2.34,1.68 4.28,1.68 4.28,-0.02
Mechanical 6:
  circle w0.25: c-1.89,1.13 r0.125
Mechanical 15:
  region: -4.06,2.28 -4.06,2.305 -4.095,2.34 -4.145,2.34 -4.18,2.305 -4.18,2.28 -4.18,2.255 -4.145,2.22 -4.095,2.22 -4.06,2.255 -4.06,2.28
  region: -1.976,2.28 -1.776,2.28 -1.776,1.38 -1.976,1.38
  region: -0.726,2.28 -0.526,2.28 -0.526,1.38 -0.726,1.38
  region: 0.525,2.28 0.725,2.28 0.725,1.38 0.525,1.38
  region: 1.77,2.28 1.97,2.28 1.97,1.38 1.77,1.38
  region: 3.575,-0.57 3.875,-0.57 3.875,-2.57 3.575,-2.57
  region: -3.875,-0.57 -3.575,-0.57 -3.575,-2.57 -3.875,-2.57
  lines w0.051: -4.12,-2.57 -4.12,1.48 4.13,1.48 4.13,-2.57 -4.12,-2.57
3D body "卧贴.step": height 4.26, standoff 0, extent -4.125,-2.583 4.125,2.277